# Altium schematic symbol library Eth_Local.SchLib: 11 symbols
Pins are listed as number, name and electrical type; pins without a type are passive.

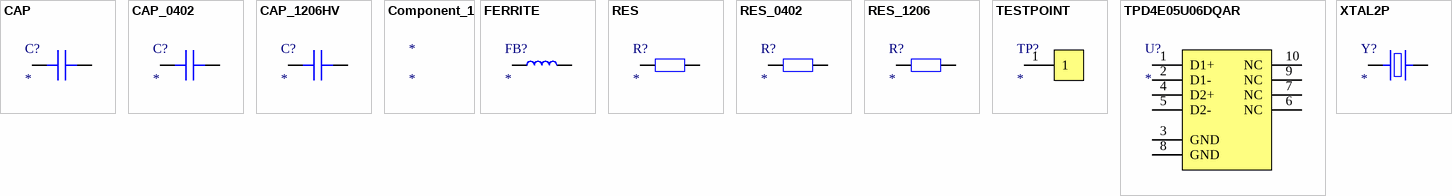
[diagram p0: symbols CAP to XTAL2P]

## CAP
designator C?
Capacitor, non-polarised
pins: 1, 2

## CAP_0402
designator C?
Capacitor, non-polarised
footprint CAPC1005X55N_GRM155
pins: 1, 2

## CAP_1206HV
designator C?
Capacitor, non-polarised
footprint CAPC3316X180N_AVX1206HV
pins: 1, 2

## Component_1
designator *

## FERRITE
designator FB?
Ferrite bead
footprint MURATA_BLM18P_0603
pins: 1, 2

## RES
designator R?
Resistor
pins: 1, 2

## RES_0402
designator R?
Resistor
footprint RESC1005X40N_RC0402
pins: 1, 2

## RES_1206
designator R?
Resistor
footprint RESC3216X65N_RC1206
pins: 1, 2

## TESTPOINT
designator TP?
Test point, single pad
footprint TP_SMD_1R00
pins: 1

## TPD4E05U06DQAR
designator U?
4-ch ESD protection, 0.5pF, USON-10 (DQA). Pin names use '-' for TI's en dash.
footprint TI_USON-10_DQA0010A
pins: 1 D1+, 2 D1-, 3 GND (power), 4 D2+, 5 D2-, 6 NC, 7 NC, 8 GND (power), 9 NC, 10 NC

## XTAL2P
designator Y?
Crystal, 2 pad
footprint ABRACON_ABM3_5.0x3.2
pins: 1, 2